# Altium schematic symbol library SamacSys.SchLib: 2 symbols
Pins are listed as number, name and electrical type; pins without a type are passive.

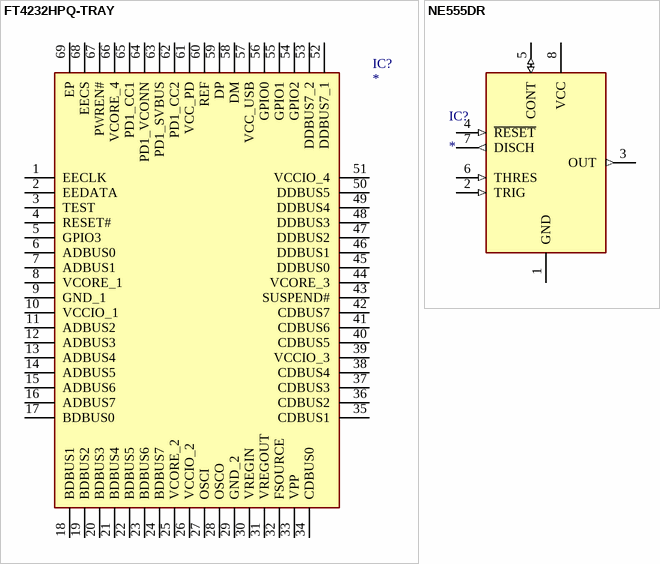
[diagram p0: symbols FT4232HPQ-TRAY to NE555DR]

## FT4232HPQ-TRAY
designator IC?
Integrated Circuit; Manufacturer_Name: FTDI Chip; Manufacturer_Part_Number: FT4232HPQ-TRAY; Datasheet Link: https://www.ftdichip.com/Support/Documents/DataSheets/ICs/DS_FT4233HP.pdf; Height: 0.8mm; Mouser Part Number: 895-FT4232HPQ-TRAY; Mouser Price/Stock: https://www.mouser.co.uk/ProductDetail/FTDI/FT4232HPQ-TRAY?qs=DRkmTr78QATL4FSPfVZC7Q%3D%3D
footprint QFN40P800X800X80-69N-D
pins: 1 EECLK, 2 EEDATA, 3 TEST, 4 RESET#, 5 GPIO3, 6 ADBUS0, 7 ADBUS1, 8 VCORE_1, 9 GND_1, 10 VCCIO_1, 11 ADBUS2, 12 ADBUS3, 13 ADBUS4, 14 ADBUS5, 15 ADBUS6, 16 ADBUS7, 17 BDBUS0, 18 BDBUS1, 19 BDBUS2, 20 BDBUS3, 21 BDBUS4, 22 BDBUS5, 23 BDBUS6, 24 BDBUS7, 25 VCORE_2, 26 VCCIO_2, 27 OSCI, 28 OSCO, 29 GND_2, 30 VREGIN, 31 VREGOUT, 32 FSOURCE, 33 VPP, 34 CDBUS0, 35 CDBUS1, 36 CDBUS2, 37 CDBUS3, 38 CDBUS4, 39 VCCIO_3, 40 CDBUS5, 41 CDBUS6, 42 CDBUS7, 43 SUSPEND#, 44 VCORE_3, 45 DDBUS0, 46 DDBUS1, 47 DDBUS2, 48 DDBUS3, 49 DDBUS4, 50 DDBUS5, 51 VCCIO_4, 52 DDBUS7_1, 53 DDBUS7_2, 54 GPIO2, 55 GPIO1, 56 GPIO0, 57 VCC_USB, 58 DM, 59 DP, 60 REF, 61 VCC_PD, 62 PD1_CC2, 63 PD1_SVBUS, 64 PD1_VCONN, 65 PD1_CC1, 66 VCORE_4, 67 PWREN#, 68 EECS, 69 EP

## NE555DR
designator IC?
Integrated Circuit; Manufacturer_Name: Texas Instruments; Manufacturer_Part_Number: NE555DR; Datasheet Link: http://www.ti.com/lit/ds/symlink/ne555.pdf; Height: 1.75mm; Mouser Part Number: 595-NE555DR; Mouser Price/Stock: https://www.mouser.com/Search/Refine.aspx?Keyword=595-NE555DR; RS Part Number: 1218414; RS Price/Stock: http://uk.rs-online.com/web/p/products/1218414
footprint SOIC127P600X175-8N
pins: 1 GND (power), 2 TRIG (in), 3 OUT (out), 4 ~{RESET} (in), 5 CONT (io), 6 THRES (in), 7 DISCH (out), 8 VCC (power)